# Altium footprint library SYNCBOX.PcbLib: 77 footprints (part 2 of 5)
Each footprint in its own frame and in the unit in brackets; x right, y up, seen from the top. Pads: shape width x height; smd on the part's side, far side on the other; paste and mask are expansions set on the pad; w line width, h text height; cw(c..) or ccw(c..) is an arc to the next point about the centre after c.
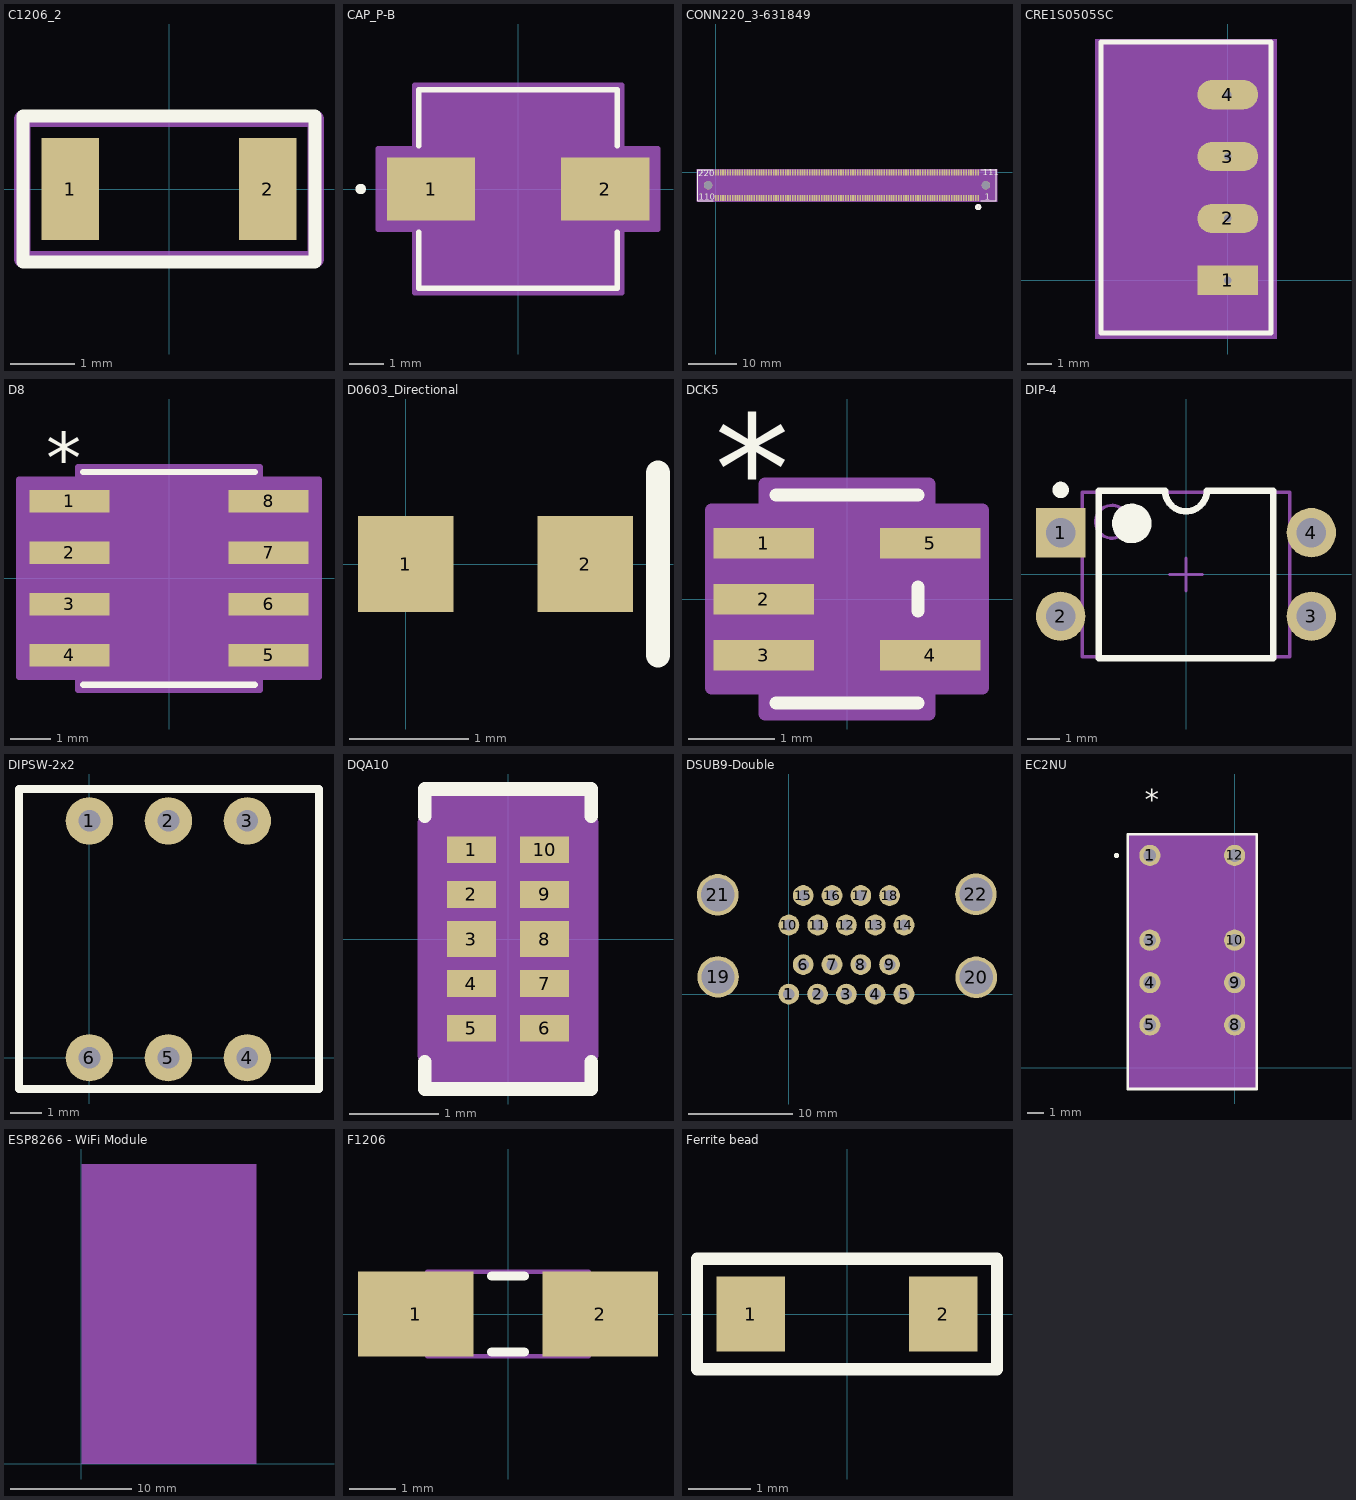
[diagram p1: the footprints below, top view; thin cyan lines are the x and y axes]

## C1206_2 [mm]
pads (2):
  rect 0.9x1.6 smd: 1(-1.55,0) 2(1.55,0)
Top Overlay:
  lines w0.2: -2.286,-1.143 -2.286,1.143 2.286,1.143 2.286,-1.143 -2.286,-1.143
Mechanical 16:
  lines w0.254: -2.3,-1.1 2.3,-1.1 2.3,1.1 -2.3,1.1 -2.3,-1.1
Mechanical 29:
  text ".Designator" at 1.8,0.5 h1
3D body "CAPC3216X95N EIA 1206.step": height 0.95, standoff 0, extent -1.6,-0.8 1.6,0.8
3D body "CAPC3216X95N EIA 1206.step": height 1.8, standoff 0.85, extent -1.6,-0.8 1.6,0.8

## CAP_P-B [mil]
pads (2):
  rect 101x72 smd paste+0 mask+0: 1(-99.5,0) 2(99.5,0)
Top Overlay:
  circle w6: c-180,0 r3
  lines w6: -113.5,-49.1 -113.5,-113.5 113.5,-113.5 113.5,-49.1 ; -113.5,49.1 -113.5,113.5 113.5,113.5 113.5,49.1
Mechanical 13:
  circle w0: c-88.5,0 r3
  lines w1: -108.5,-54.25 -54.25,-108.5 ; -108.5,54.25 -54.25,108.5 ; -108.5,-108.5 -108.5,108.5 108.5,108.5 108.5,-108.5 -108.5,-108.5
Mechanical 15:
  region: -118.5,-46 -160,-46 -160,46 -118.5,46 -118.5,118.5 118.5,118.5 118.5,46 160,46 160,-46 118.5,-46 118.5,-118.5 -118.5,-118.5
  lines w6: -160,-46 -118.5,-46 -118.5,-118.5 118.5,-118.5 118.5,-46 160,-46 160,46 118.5,46 118.5,118.5 -118.5,118.5 -118.5,46 -160,46 -160,-46
3D body "P-B.step": height 234.09, standoff 0, extent -122,-108.5 122.01,108.51
3D body: height 10, standoff 0, extent 0,0 10,10

## COMe-mBT10 [mm]
3D body "COMe-mBT10.STEP": height -42.13, standoff -50.38, extent -30.316,46.914 53.684,101.914

## CONN220_3-631849 [mil]
pads (222):
  rect 13x47 smd paste+0 mask+0: 1(2145.67,-208.66) 2(2125.98,-208.66) 3(2106.3,-208.66) 4(2086.61,-208.66) 5(2066.93,-208.66) 6(2047.24,-208.66) 7(2027.56,-208.66) 8(2007.87,-208.66) 9(1988.19,-208.66) 10(1968.5,-208.66) 11(1948.82,-208.66) 12(1929.13,-208.66) 13(1909.45,-208.66) 14(1889.76,-208.66) 15(1870.08,-208.66) 16(1850.39,-208.66) 17(1830.71,-208.66) 18(1811.02,-208.66) 19(1791.34,-208.66) 20(1771.65,-208.66) 21(1751.97,-208.66) 22(1732.28,-208.66) 23(1712.6,-208.66) 24(1692.91,-208.66) 25(1673.23,-208.66) 26(1653.54,-208.66) 27(1633.86,-208.66) 28(1614.17,-208.66) 29(1594.49,-208.66) 30(1574.8,-208.66) 31(1555.12,-208.66) 32(1535.43,-208.66) 33(1515.75,-208.66) 34(1496.06,-208.66) 35(1476.38,-208.66) 36(1456.69,-208.66) 37(1437.01,-208.66) 38(1417.32,-208.66) 39(1397.64,-208.66) 40(1377.95,-208.66) 41(1358.27,-208.66) 42(1338.58,-208.66) 43(1318.9,-208.66) 44(1299.21,-208.66) 45(1279.53,-208.66) 46(1259.84,-208.66) 47(1240.16,-208.66) 48(1220.47,-208.66) 49(1200.79,-208.66) 50(1181.1,-208.66) 51(1161.42,-208.66) 52(1141.73,-208.66) 53(1122.05,-208.66) 54(1102.36,-208.66) 55(1082.68,-208.66) 56(1062.99,-208.66) 57(1043.31,-208.66) 58(1023.62,-208.66) 59(1003.94,-208.66) 60(984.25,-208.66) 61(964.57,-208.66) 62(944.88,-208.66) 63(925.2,-208.66) 64(905.51,-208.66) 65(885.83,-208.66) 66(866.14,-208.66) 67(846.46,-208.66) 68(826.77,-208.66) 69(807.09,-208.66) 70(787.4,-208.66) 71(767.72,-208.66) 72(748.03,-208.66) 73(728.35,-208.66) 74(708.66,-208.66) 75(688.98,-208.66) 76(669.29,-208.66) 77(649.61,-208.66) 78(629.92,-208.66) 79(610.24,-208.66) 80(590.55,-208.66) 81(570.87,-208.66) 82(551.18,-208.66) 83(531.5,-208.66) 84(511.81,-208.66) 85(492.13,-208.66) 86(472.44,-208.66) 87(452.76,-208.66) 88(433.07,-208.66) 89(413.39,-208.66) 90(393.7,-208.66) 91(374.02,-208.66) 92(354.33,-208.66) 93(334.65,-208.66) 94(314.96,-208.66) 95(295.28,-208.66) 96(275.59,-208.66) 97(255.91,-208.66) 98(236.22,-208.66) 99(216.54,-208.66) 100(196.85,-208.66) 101(177.17,-208.66) 102(157.48,-208.66) 103(137.8,-208.66) 104(118.11,-208.66) 105(98.43,-208.66) 106(78.74,-208.66) 107(59.06,-208.66) 108(39.37,-208.66) 109(19.69,-208.66) 110(0,-208.66) 111(2145.67,0) 112(2125.98,0) 113(2106.3,0) 114(2086.61,0) 115(2066.93,0) 116(2047.24,0) 117(2027.56,0) 118(2007.87,0) 119(1988.19,0) 120(1968.5,0) 121(1948.82,0) 122(1929.13,0) 123(1909.45,0) 124(1889.76,0) 125(1870.08,0) 126(1850.39,0) 127(1830.71,0) 128(1811.02,0) 129(1791.34,0) 130(1771.65,0) 131(1751.97,0) 132(1732.28,0) 133(1712.6,0) 134(1692.91,0) 135(1673.23,0) 136(1653.54,0) 137(1633.86,0) 138(1614.17,0) 139(1594.49,0) 140(1574.8,0) 141(1555.12,0) 142(1535.43,0) 143(1515.75,0) 144(1496.06,0) 145(1476.38,0) 146(1456.69,0) 147(1437.01,0) 148(1417.32,0) 149(1397.64,0) 150(1377.95,0) 151(1358.27,0) 152(1338.58,0) 153(1318.9,0) 154(1299.21,0) 155(1279.53,0) 156(1259.84,0) 157(1240.16,0) 158(1220.47,0) 159(1200.79,0) 160(1181.1,0) 161(1161.42,0) 162(1141.73,0) 163(1122.05,0) 164(1102.36,0) 165(1082.68,0) 166(1062.99,0) 167(1043.31,0) 168(1023.62,0) 169(1003.94,0) 170(984.25,0) 171(964.57,0) 172(944.88,0) 173(925.2,0) 174(905.51,0) 175(885.83,0) 176(866.14,0) 177(846.46,0) 178(826.77,0) 179(807.09,0) 180(787.4,0) 181(767.72,0) 182(748.03,0) 183(728.35,0) 184(708.66,0) 185(688.98,0) 186(669.29,0) 187(649.61,0) 188(629.92,0) 189(610.24,0) 190(590.55,0) 191(570.87,0) 192(551.18,0) 193(531.5,0) 194(511.81,0) 195(492.13,0) 196(472.44,0) 197(452.76,0) 198(433.07,0) 199(413.39,0) 200(393.7,0) 201(374.02,0) 202(354.33,0) 203(334.65,0) 204(314.96,0) 205(295.28,0) 206(275.59,0) 207(255.91,0) 208(236.22,0) 209(216.54,0) 210(196.85,0) 211(177.17,0) 212(157.48,0) 213(137.8,0) 214(118.11,0) 215(98.43,0) 216(78.74,0) 217(59.06,0) 218(39.37,0) 219(19.69,0) 220(0,0)
  round 69 / inner round 60 / far side round 69 hole 69: 221(-63.17,-104.33) 222(2208.83,-104.33)
Top Overlay:
  circle w20: c2145.67,-283.66 r15
  lines w6: -19.6,-231.33 -148.67,-231.33 -148.67,22.67 -19.6,22.67 ; 2165.27,-231.33 2294.33,-231.33 2294.33,22.67 2165.24,22.67
  text "1" at 2197.5,-225 h50
  text "111" at 2182.5,-25 h50
  text "110" at -138,-224 h50
  text "220" at -142,-32 h50
Mechanical 13:
  circle w20: c2145.67,-283.66 r15
  lines w1: -143.67,-226.33 2289.33,-226.33 2289.33,17.67 -143.67,17.67 -143.67,-226.33
  text "1" at 2197.5,-225 h50
  text "111" at 2182.5,-25 h50
  text "110" at -138,-224 h50
  text "220" at -142,-33 h50
Mechanical 15:
  region: 2299.33,27.67 -153.67,27.67 -153.67,-236.33 2299.33,-236.33
  lines w6: -153.67,-236.33 -153.67,27.67 2299.33,27.67 2299.33,-236.33 -153.67,-236.33
3D body: height 10, standoff 0, extent 0,0 10,10
3D body "c-3-6318491-6-c1-3d.stp": height 292, standoff -24.93, extent -143.07,-224.05 2290,20.05

## CRE1S0505SC [mm]
pads (4):
  rect 2.5x1.2 hole 0.3 square: 1(0,0)
  oval 2.5x1.2 hole 0.3 square: 2(0,2.54) 3(0,5.08) 4(0,7.62)
Top Overlay:
  lines w0.2: -5.207,-2.159 -5.207,9.779 1.778,9.779 1.778,-2.159 -5.207,-2.159
Mechanical 15:
  rectangle: -5.461,-2.413 2.032,9.906
3D body "mps_dcdc_cre1s_sc_a.step": height 10.19, standoff -3.91, extent -4.953,-2.209 1.167,9.321

## D8 [mil]
pads (8):
  rect 78x22 smd paste+0 mask+0: 1(-97,75) 2(-97,25) 3(-97,-25) 4(-97,-75) 5(97,-75) 6(97,-25) 7(97,25) 8(97,75)
Top Overlay:
  lines w6: -83.5,-103.5 83.5,-103.5 ; -83.5,103.5 83.5,103.5
  text "*" at -119.5,92 h50
Mechanical 13:
  lines w0: -12,98.5 ccw(c0,98.5) 12,98.5
  lines w1: -122,-85 -122,-65 -78.5,-65 -78.5,-85 -122,-85 ; -122,-35 -122,-15 -78.5,-15 -78.5,-35 -122,-35 ; -122,15 -122,35 -78.5,35 -78.5,15 -122,15 ; -122,65 -122,85 -78.5,85 -78.5,65 -122,65 ; -78.5,-98.5 78.5,-98.5 78.5,98.5 -78.5,98.5 -78.5,-98.5 ; 78.5,-85 78.5,-65 122,-65 122,-85 78.5,-85 ; 78.5,-35 78.5,-15 122,-15 122,-35 78.5,-35 ; 78.5,15 78.5,35 122,35 122,15 78.5,15 ; 78.5,65 78.5,85 122,85 122,65 78.5,65
  text "*" at -76,45.5 h50
Mechanical 15:
  region: -88.5,-96 -146,-96 -146,96 -88.5,96 -88.5,108.5 88.5,108.5 88.5,96 146,96 146,-96 88.5,-96 88.5,-108.5 -88.5,-108.5
  lines w6: -146,-96 -146,96 -88.5,96 -88.5,108.5 88.5,108.5 88.5,96 146,96 146,-96 88.5,-96 88.5,-108.5 -88.5,-108.5 -88.5,-96 -146,-96
3D body "D8.step": height 69.09, standoff 0, extent -122,-98.5 122.01,98.51
3D body: height 10, standoff 0, extent 0,0 10,10

## D0603_Directional [mm]
pads (2):
  rect 0.8x0.8 smd: 1(0,0) 2(1.5,0)
Top Overlay:
  lines w0.203: 2.108,-0.762 2.108,0.762
3D body "0603_single.stp": height 0.71, standoff -0.01, extent -0.051,-0.394 1.575,0.394

## DCK5 [mil]
pads (5):
  rect 46x14 smd paste+0 mask+0: 1(-38,25.59) 2(-38,0) 3(-38,-25.59) 4(38,-25.59) 5(38,25.59)
Top Overlay:
  lines w6: -32.5,-47.5 32.5,-47.5 ; -32.5,47.5 32.5,47.5 ; 32.5,-5.49 32.5,5.49
  text "*" at -60.5,34.59 h50
Mechanical 13:
  lines w0: -12,42.5 ccw(c0,42.5) 12,42.5
  lines w1: -47,-31.59 -27.5,-31.59 -27.5,-19.59 -47,-19.59 -47,-31.59 ; -47,-6 -27.5,-6 -27.5,6 -47,6 -47,-6 ; -47,19.59 -27.5,19.59 -27.5,31.59 -47,31.59 -47,19.59 ; -27.5,-42.5 -27.5,42.5 27.5,42.5 27.5,-42.5 -27.5,-42.5 ; 27.5,-31.59 47,-31.59 47,-19.59 27.5,-19.59 27.5,-31.59 ; 27.5,19.59 47,19.59 47,31.59 27.5,31.59 27.5,19.59
  text "*" at -30,-3.41 h50
Mechanical 15:
  region: 37.5,-52.5 -37.5,-52.5 -37.5,-40.59 -62,-40.59 -62,40.59 -37.5,40.59 -37.5,52.5 37.5,52.5 37.5,40.59 62,40.59 62,-40.59 37.5,-40.59
  lines w6: -62,-40.59 -62,40.59 -37.5,40.59 -37.5,52.5 37.5,52.5 37.5,40.59 62,40.59 62,-40.59 37.5,-40.59 37.5,-52.5 -37.5,-52.5 -37.5,-40.59 -62,-40.59
3D body: height 19.68, standoff 0, extent 35,-30 55,-20
3D body: height 19.68, standoff 0, extent 35,20 55,30
3D body: height 19.68, standoff 0, extent -55,-30 -35,-20
3D body: height 19.68, standoff 0, extent -55,-5 -35,5
3D body: height 19.68, standoff 0, extent -55,20 -35,30
3D body: height 57.09, standoff 0, extent -35,-45 35,50
3D body: height 10, standoff 0, extent 0,0 10,10

## DIP-4 [mm]
pads (4):
  rect 1.5x1.5 hole 0.9: 1(-3.81,1.27)
  round 1.5 hole 0.9: 2(-3.81,-1.27) 3(3.81,-1.27) 4(3.81,1.27)
Top Overlay:
  circle w0.6: c-1.65,1.55 r0.3
  circle w0.25: c-3.81,2.57 r0.125
  lines w0.2: -2.65,-2.55 2.65,-2.55 2.65,2.55 0.635,2.55 cw(c0,2.55) -0.635,2.55 -2.65,2.55 -2.65,-2.55
Mechanical 13:
  circle w0.1: c-2.25,1.6 r0.5
  lines w0.1: -3.15,-2.5 3.15,-2.5 3.15,2.5 -3.15,2.5 -3.15,-2.5
Mechanical 15:
  lines w0.1: -0.5,0 0.5,0 ; 0,-0.5 0,0.5
3D body: height 5.6, standoff 0, extent -3.15,-2.5 3.15,2.5

## DIPSW-2x2 [mil]
pads (6):
  round 60 hole 27.56: 1(0,300) 2(100,300) 3(200,300) 4(200,0) 5(100,0) 6(0,0)
Top Overlay:
  lines w10: -89.17,-39.57 290.75,-39.57 290.75,340.35 -89.17,340.35 -89.17,-39.57
3D body "KAP1103E.stp": height 397.12, standoff -137.8, extent -78.71,-50.59 282.71,445.87

## DQA10 [mm]
pads (10):
  rect 0.55x0.3 smd paste-0.15 mask+0: 1(-0.41,1) 2(-0.41,0.5) 4(-0.41,-0.5) 5(-0.41,-1) 6(0.41,-1) 7(0.41,-0.5) 9(0.41,0.5) 10(0.41,1)
  rect 0.55x0.4 smd paste+0 mask+0: 3(-0.41,0) 8(0.41,0)
Top Overlay:
  lines w0.152: -0.931,-1.374 -0.931,-1.681 0.931,-1.681 0.931,-1.374 ; -0.931,1.374 -0.931,1.681 0.931,1.681 0.931,1.374
Top Paste:
  region: -0.135,1.15 -0.685,1.15 -0.685,0.85 -0.135,0.85
  region: -0.135,0.65 -0.685,0.65 -0.685,0.35 -0.135,0.35
  region: -0.135,0.15 -0.685,0.15 -0.685,-0.15 -0.135,-0.15
  region: -0.135,-0.35 -0.685,-0.35 -0.685,-0.65 -0.135,-0.65
  region: -0.135,-0.85 -0.685,-0.85 -0.685,-1.15 -0.135,-1.15
  region: 0.685,-0.85 0.135,-0.85 0.135,-1.15 0.685,-1.15
  region: 0.685,-0.35 0.135,-0.35 0.135,-0.65 0.685,-0.65
  region: 0.685,0.15 0.135,0.15 0.135,-0.15 0.685,-0.15
  region: 0.685,0.65 0.135,0.65 0.135,0.35 0.685,0.35
  region: 0.685,1.15 0.135,1.15 0.135,0.85 0.685,0.85
Top Solder:
  region: -0.085,1.2 -0.735,1.2 -0.735,0.8 -0.085,0.8
  region: -0.085,0.7 -0.735,0.7 -0.735,0.3 -0.085,0.3
  region: -0.085,0.2 -0.735,0.2 -0.735,-0.2 -0.085,-0.2
  region: -0.085,-0.3 -0.735,-0.3 -0.735,-0.7 -0.085,-0.7
  region: -0.085,-0.8 -0.735,-0.8 -0.735,-1.2 -0.085,-1.2
  region: 0.735,-0.8 0.085,-0.8 0.085,-1.2 0.735,-1.2
  region: 0.735,-0.3 0.085,-0.3 0.085,-0.7 0.735,-0.7
  region: 0.735,0.2 0.085,0.2 0.085,-0.2 0.735,-0.2
  region: 0.735,0.7 0.085,0.7 0.085,0.3 0.735,0.3
  region: 0.735,1.2 0.085,1.2 0.085,0.8 0.735,0.8
Mechanical 13:
  lines w0: -0.305,1.3 ccw(c0,1.3) 0.305,1.3
  lines w0.025: -0.55,-1.3 0.55,-1.3 0.55,1.3 -0.55,1.3 -0.55,-1.3
Mechanical 15:
  region: -0.804,-1.301 -0.939,-1.301 -0.939,1.301 -0.804,1.301 -0.804,1.554 0.804,1.554 0.804,1.301 0.939,1.301 0.939,-1.301 0.804,-1.301 0.804,-1.554 -0.804,-1.554
  lines w0.152: -0.939,-1.301 -0.939,1.301 -0.804,1.301 -0.804,1.554 0.804,1.554 0.804,1.301 0.939,1.301 0.939,-1.301 0.804,-1.301 0.804,-1.554 -0.804,-1.554 -0.804,-1.301 -0.939,-1.301
3D body: height 0.25, standoff 0, extent 0,0 0.254,0.254
3D body "DQA10.stp": height 0.55, standoff 0, extent -0.55,-1.3 0.55,1.3

## DSUB9-Double [mm]
pads (22):
  round 2 hole 1.1: 1(-0.01,-0.005) 2(2.765,-0.005) 3(5.54,-0.005) 4(8.315,-0.005) 5(11.09,0) 6(1.377,2.84) 7(4.152,2.84) 8(6.927,2.84) 9(9.702,2.84) 10(0,6.65) 11(2.772,6.65) 12(5.545,6.65) 13(8.317,6.65) 14(11.09,6.65) 15(1.377,9.49) 16(4.152,9.49) 17(6.927,9.49) 18(9.702,9.49)
  round 4 hole 3.2: 19(-6.82,1.65) 20(18.05,1.61) 21(-6.855,9.56) 22(18.02,9.61)
3D body "178-009-613.STEP": height 32.57, standoff -2.38, extent -9.815,-1.585 20.995,23.815

## EC2NU [mil]
pads (8):
  round 50 / inner round 60 / far side round 50 hole 30 paste+0 mask+0: 1(-200,501) 3(-200,301) 4(-200,201) 5(-200,101) 8(0,101) 9(0,201) 10(0,301) 12(0,501)
Top Overlay:
  circle w6: c-279,501 r3
  lines w6: -252.5,-50 52.5,-50 52.5,551 -252.5,551 -252.5,-50
  text "*" at -212.5,607.67 h50
Mechanical 13:
  circle w0: c-175,501 r3
  lines w0: -112,546 ccw(c-100,546) -88,546
  lines w1: -247.5,-45 47.5,-45 47.5,546 -247.5,546 -247.5,-45
  text "*" at -212.5,517.67 h50
Mechanical 15:
  region: 49.5,-47 -249.5,-47 -249.5,548 49.5,548
  region: 47.5,-45 -247.5,-45 -247.5,546 47.5,546
  lines w6: -249.5,-47 -249.5,548 49.5,548 49.5,-47 -249.5,-47
3D body: height 10, standoff 0, extent 0,0 10,10
3D body "EC2NU.stp": height 370.12, standoff -100, extent -247.48,-44.98 47.48,546

## ESP8266 - WiFi Module [mm]
Mechanical 15:
  rectangle: 0,-0.025 14.503,24.816
3D body "13678.STEP": height 5.63, standoff -5.8, extent 0.003,-0.005 14.503,24.795

## F1206 [mm]
pads (2):
  rect 2.5x1.85 smd: 1(-2,0) 2(2,0)
Top Overlay:
  lines w0.2: -0.35,-0.825 0.35,-0.825 ; -0.35,0.825 0.35,0.825
Mechanical 13:
  lines w0.1: -1.75,-0.915 1.75,-0.915 1.75,0.915 -1.75,0.915 -1.75,-0.915
3D body: height 0.7, standoff 0, extent -1.75,-0.915 1.75,0.915

## Ferrite bead [mm]
pads (2):
  rect 1.1x1.2 smd: 1(-1.55,0) 2(1.55,0)
Top Overlay:
  lines w0.2: -2.413,-0.889 -2.413,0.587 -2.413,0.889 2.413,0.889 2.413,-0.889 -2.413,-0.889
3D body "STEP-WE-CBF-1206-rev1.stp": height 1.08, standoff -0.02, extent -1.6,-0.8 1.6,0.8